# Altium footprint library DS_PcbLib.PcbLib: 44 footprints (part 2 of 3)
Each footprint in its own frame and in the unit in brackets; x right, y up, seen from the top. Pads: shape width x height; smd on the part's side, far side on the other; paste and mask are expansions set on the pad; w line width, h text height; cw(c..) or ccw(c..) is an arc to the next point about the centre after c.
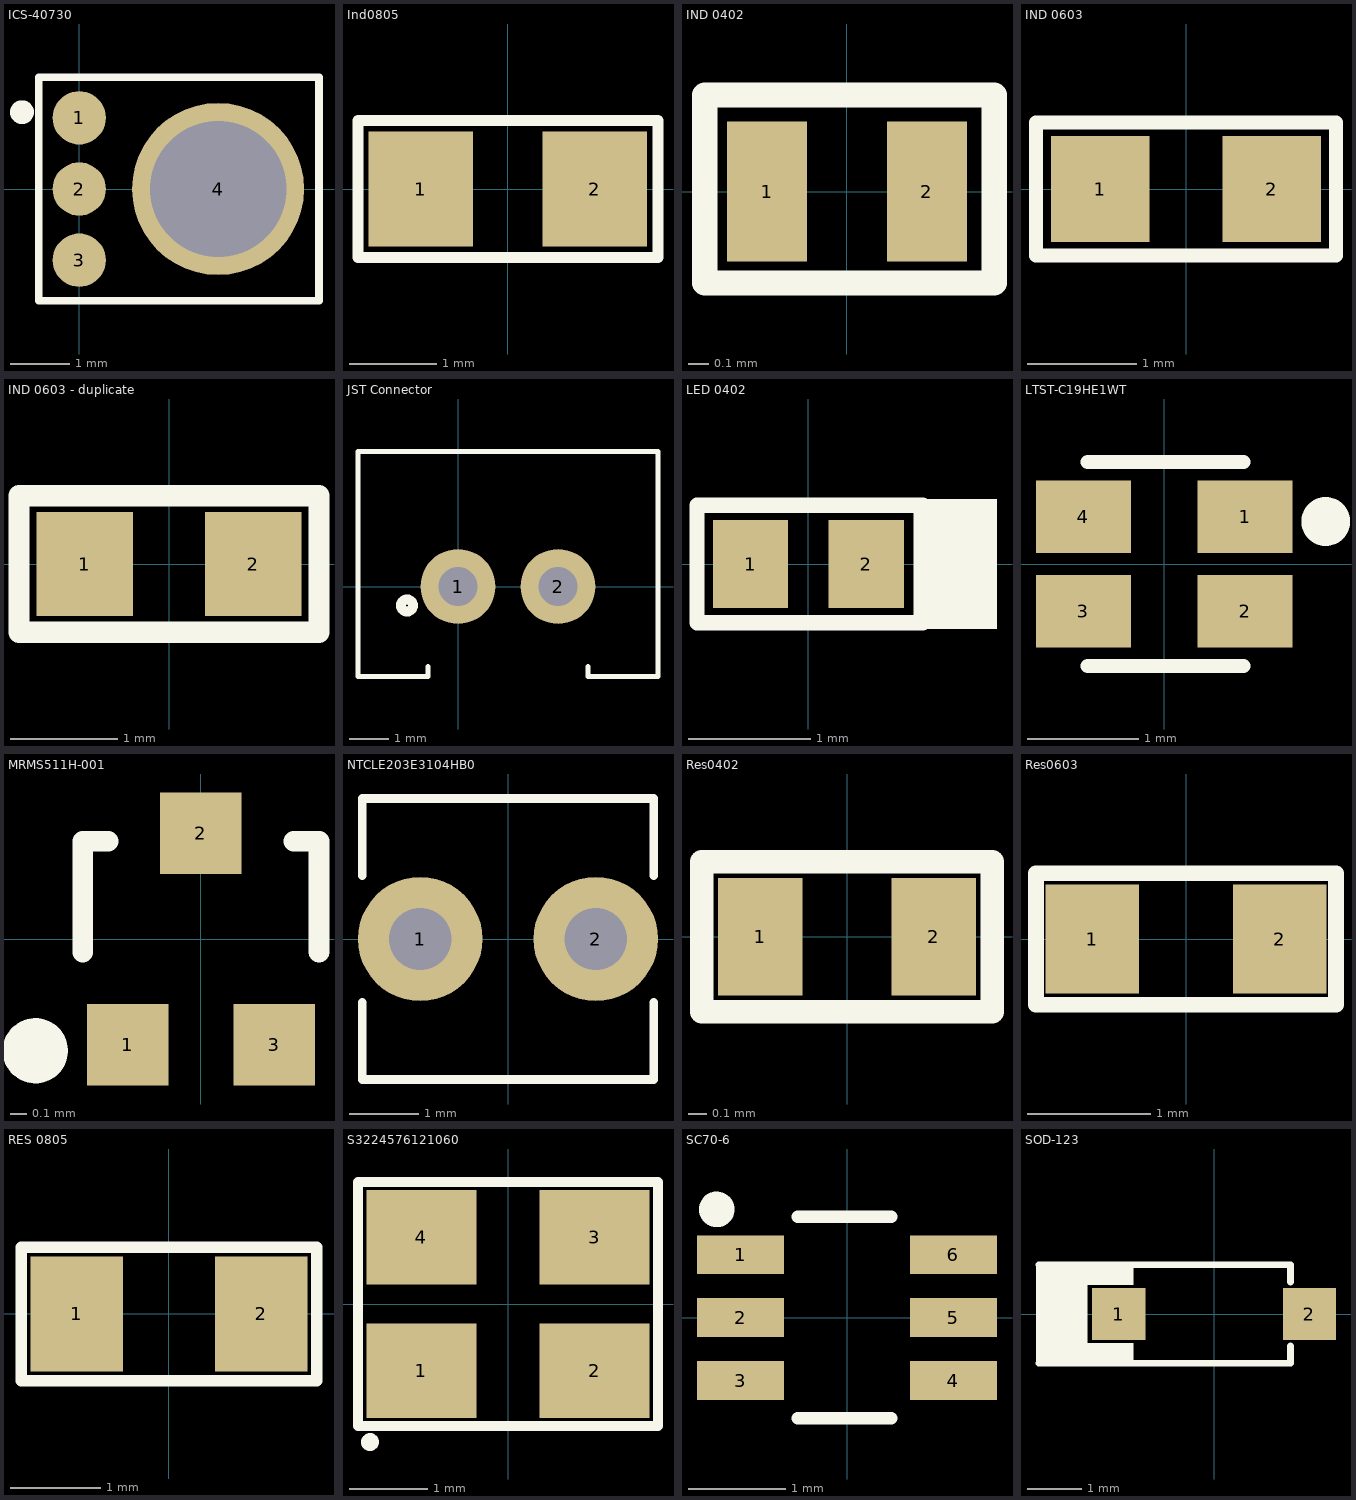
[diagram p1: the footprints below, top view; thin cyan lines are the x and y axes]

## ICS-40730 [mm]
pads (4):
  round 0.9 smd: 1(0,1.2) 2(0,0) 3(0,-1.2)
  round 2.9 hole 2.3: 4(2.34,0)
Top Overlay:
  circle w0.3: c-0.965,1.295 r0.05
  lines w0.127: -0.68,-1.88 4.04,-1.88 4.04,1.88 -0.68,1.88 -0.68,-1.88

## Ind0805 [mm] "Inductor 0805"
pads (2):
  rect 1.2x1.32 smd: 1(-1,0) 2(1,0)
Top Overlay:
  lines w0.127: -1.723,-0.787 1.727,-0.787 1.727,0.787 -1.723,0.787 -1.723,-0.787
3D body "45637.stp": height 0.47, standoff -0.03, extent -1,-0.625 1,0.625

## IND 0402 [mm]
pads (2):
  rect 0.4x0.7 smd: 1(-0.4,0) 2(0.4,0)
Top Overlay:
  lines w0.127: -0.711,-0.457 0.737,-0.457 0.737,0.483 -0.711,0.483 -0.711,-0.457
3D body "User Library-Chip Inductor.step": height 0.49, standoff -0.01, extent -0.5,-0.295 0.5,0.305

## IND 0603 [mm]
pads (2):
  rect 0.9x0.97 smd: 1(-0.785,0) 2(0.785,0)
Top Overlay:
  lines w0.127: -1.372,-0.61 1.372,-0.61 1.372,0.61 -1.372,0.61 -1.372,-0.61
3D body "45630.stp": height 0.76, standoff -0.04, extent -0.8,-0.4 0.8,0.4

## IND 0603 - duplicate [mm]
pads (2):
  rect 0.9x0.97 smd: 1(-0.785,0) 2(0.785,0)
Top Overlay:
  lines w0.2: -1.397,-0.635 1.397,-0.635 1.397,0.635 -1.397,0.635 -1.397,-0.635
3D body "45630.stp": height 0.78, standoff -0.02, extent -0.8,-0.4 0.8,0.4

## JST Connector [mil] "2 Pin JST Connector"
pads (2):
  round 75 hole 39: 1(0,0) 2(100,0)
Top Overlay:
  circle w10: c-51,-19 r6
  lines w5: -30,-80 -30,-90 -100,-90 -100,135 200,135 200,-90 130,-90 130,-80
3D body "User Library-PW10-XX-M blue.step": height 283.59, standoff -121.92, extent -97.64,-89.41 197.64,135

## LED 0402 [mm]
pads (2):
  rect 0.62x0.72 smd: 1(-0.475,0) 2(0.475,0)
Top Overlay:
  rectangle: 0.864,-0.533 1.549,0.533
  lines w0.127: 0.94,-0.483 -0.914,-0.483 -0.914,0.483 0.94,0.483
3D body "User Library-LED-0402.step": height 0.45, standoff 0, extent -0.505,-0.25 0.505,0.25

## LTST-C19HE1WT [mm]
pads (4):
  rect 0.85x0.65 smd: 1(0.725,0.425) 2(0.725,-0.425) 3(-0.725,-0.425) 4(-0.725,0.425)
Top Overlay:
  circle w0.254: c1.448,0.381 r0.092
  lines w0.127: -0.686,-0.914 0.711,-0.914 ; -0.686,0.914 0.711,0.914
3D body "LTST-C19HE1WT--3DModel-STEP-56544.STEP": height 0.35, standoff 0, extent -0.8,-0.8 0.8,0.8

## MRMS511H-001 [mm]
pads (3):
  rect 0.5x0.5 smd: 1(-0.45,-0.65) 2(0,0.65) 3(0.45,-0.65)
Top Overlay:
  circle w0.2: c-1.016,-0.686 r0.1
  lines w0.127: -0.725,-0.08 -0.725,0.6 -0.57,0.6 ; 0.57,0.6 0.725,0.6 0.725,-0.08
3D body "MRMS511X-001.STEP": height 0.55, standoff 0, extent -0.725,-0.725 0.725,0.725

## NTCLE203E3104HB0 [mm]
pads (2):
  round 1.8 hole 0.9: 1(-1.27,0) 2(1.27,0)
Top Overlay:
  lines w0.127: -2.108,-0.914 -2.108,-2.032 2.108,-2.032 2.108,-0.914 ; -2.108,0.914 -2.108,2.032 2.108,2.032 2.108,0.914
3D body "NTCLE203E3202SB0.STEP": height 8.5, standoff -38.5, extent -2.099,-2 2.082,2

## Res0402 [mil]
pads (2):
  rect 18x25 smd mask+4: 1(-18.5,0) 2(18.5,0)
Top Overlay:
  lines w0.13: -32,-17 32,-17
  lines w5: -31,-16 -31,16 31,16 31,-16 -31,-16
3D body "User Library-RES_1005-0402.step": height 16.14, standoff 0, extent -22.63,-10.82 22.64,10.83

## Res0603 [mil]
pads (2):
  rect 30x35 smd: 1(-30,0) 2(30,0)
Top Overlay:
  lines w5: -48,-21 48,-21 48,21 -48,21 -48,-21
3D body "User Library-RESC1608X05N.step": height 17.76, standoff 0, extent -30.52,-16.74 30.51,16.73

## RES 0805 [mil] "SMD 0805"
pads (2):
  rect 40x50 smd: 1(-40,0) 2(40,0)
Top Overlay:
  lines w5: -64,-29 -64,29 64,29 64,-29 -64,-29
3D body "User Library-CR2012-0805.STEP": height 23.62, standoff 0, extent -39.34,-24.75 39.4,24.46

## S3224576121060 [mm] "24.576MHz SMD Crystal Resonator 12pF 60O ±10ppm -40?~+85? SMD3225-4P Crystals ROHS"
pads (4):
  rect 1.4x1.2 smd: 1(-1.1,-0.85) 2(1.1,-0.85) 3(1.1,0.85) 4(-1.1,0.85)
Top Overlay:
  circle w0.127: c-1.753,-1.753 r0.05
  lines w0.127: -1.905,-1.549 -1.905,1.549 1.905,1.549 1.905,-1.549 -1.905,-1.549
3D body "User Library-Crystal_ECX-32.STEP": height 0.82, standoff 0, extent -1.6,-1.25 1.6,1.25

## SC70-6 [mm]
pads (6):
  rect 0.9x0.4 smd: 1(-1.1,0.65) 2(-1.1,0) 3(-1.1,-0.65) 4(1.1,-0.65) 5(1.1,0) 6(1.1,0.65)
Top Overlay:
  circle w0.254: c-1.346,1.118 r0.057
  lines w0.127: -0.508,-1.041 0.457,-1.041 ; -0.508,1.041 0.457,1.041
3D body "LM66100DCKR.STEP": height 1.1, standoff 0, extent -1.05,-1 1.05,1

## SOD-123 [mm] "DIODE SCHOTTKY 100V 150MA SOD123"
pads (2):
  rect 0.97x0.95 smd: 1(-1.74,0) 2(1.74,0)
Top Overlay:
  rectangle: -3.251,-0.864 -2.311,0.924
  rectangle: -2.362,-0.924 -1.473,-0.533
  rectangle: -2.362,0.533 -1.473,0.924
  lines w0.127: -3.2,-0.899 1.397,-0.899 1.397,-0.584 ; -3.2,0.899 1.397,0.899 1.397,0.584
3D body "SOD-123_STM.step": height 1.44, standoff -0.01, extent -1.981,-0.851 1.981,0.851